# Altium schematic symbol library pin_functions_one.SchLib: 1 symbol
Pins are listed as number, name and electrical type; pins without a type are passive.

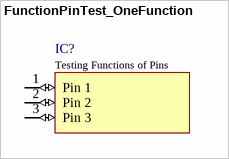
[diagram p0: symbol FunctionPinTest_OneFunction]

## FunctionPinTest_OneFunction
designator IC?, comment Testing Functions of Pins
Test Description, not relevant
pins: 1 Pin 1 (io) "Description of Pin 1", 2 Pin 2 (io) "Description of Pin 2", 3 Pin 3 (io) "Description of Pin 3"